# Altium footprint library 213_Final_Project.PcbLib: 56 footprints (part 1 of 4)
Each footprint in its own frame and in the unit in brackets; x right, y up, seen from the top. Pads: shape width x height; smd on the part's side, far side on the other; paste and mask are expansions set on the pad; w line width, h text height; cw(c..) or ccw(c..) is an arc to the next point about the centre after c.
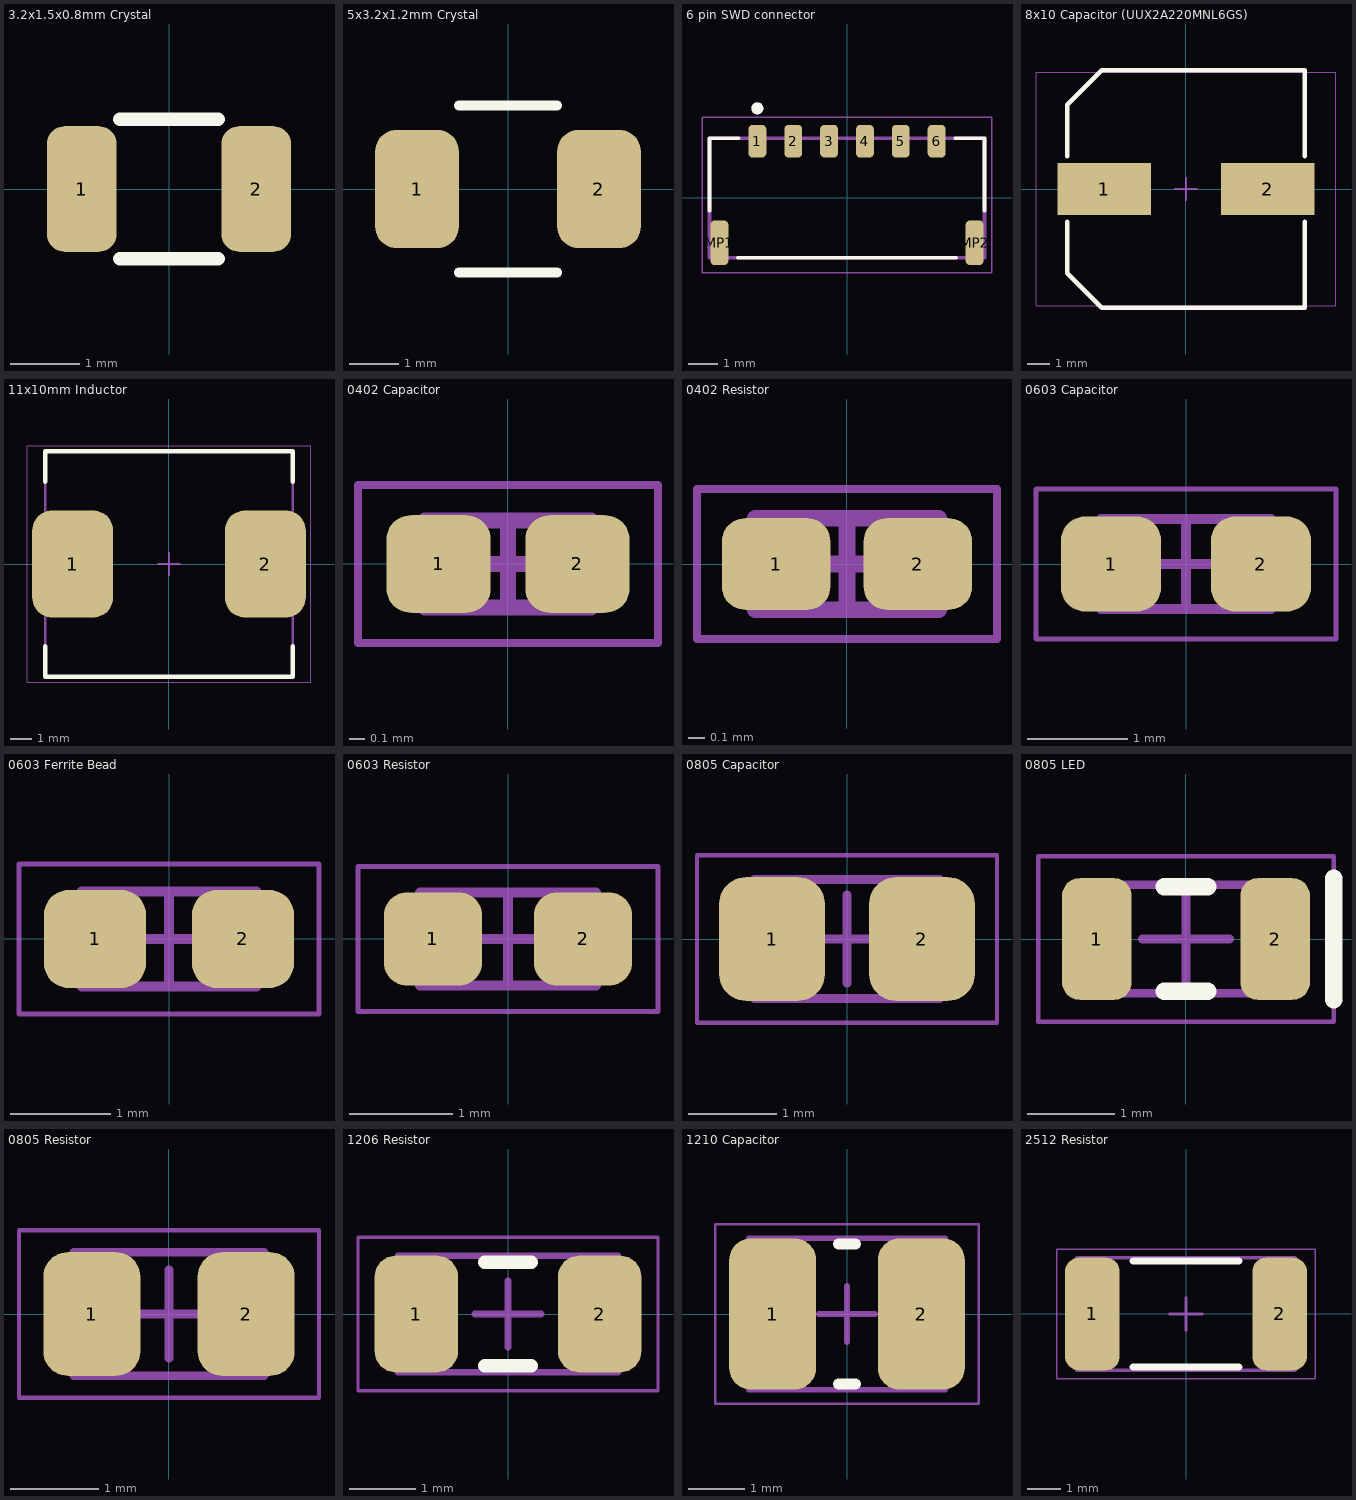
[diagram p0: the footprints below, top view; thin cyan lines are the x and y axes]

## 3.2x1.5x0.8mm Crystal [mm]
pads (2):
  rrect50% 1x1.8 smd: 1(-1.25,0) 2(1.25,0)
Top Overlay:
  lines w0.2: -0.7,-1 0.7,-1 ; -0.7,1 0.7,1
3D body "Crystal3215 (Generic).stp": height 0.8, standoff -0.03, extent -1.6,-0.75 1.6,0.75

## 5x3.2x1.2mm Crystal [mm]
pads (2):
  rrect50% 1.7x2.4 smd: 1(-1.85,0) 2(1.85,0)
Top Overlay:
  lines w0.2: -1,-1.7 1,-1.7 ; -1,1.7 1,1.7
3D body "Crystal5032 (Generic).step": height 0.8, standoff 0, extent -2.5,-1.6 2.5,1.6

## 6 pin SWD connector [mm]
pads (8):
  rrect50% 0.6x1.1 smd: 1(-3,1.9) 2(-1.8,1.9) 3(-0.6,1.9) 4(0.6,1.9) 5(1.8,1.9) 6(3,1.9)
  rrect50% 0.6x1.5 smd: MP1(-4.27,-1.5) MP2(4.27,-1.5)
Top Overlay:
  circle w0.2: c-3,3 r0.1
  lines w0.127: -4.6,-0.43 -4.6,2 -3.62,2 ; -3.65,-2 3.65,-2 ; 3.62,2 4.6,2 4.6,-0.43
Mechanical 13:
  circle w0.2: c-3,3 r0.1
  lines w0.127: -4.6,-2 -4.6,2 4.6,2 4.6,-2 -4.6,-2
Mechanical 15:
  lines w0.05: -4.85,-2.5 4.85,-2.5 4.85,2.7 -4.85,2.7 -4.85,-2.5
3D body "10125839-06RAEHLF.STEP": height 2.5, standoff -0.03, extent -4.6,-2 4.6,2.2

## 8x10 Capacitor (UUX2A220MNL6GS) [mm] "Aluminum Electrolytic Capacitor, Body 8.30x8.30x10.50mm, IPC Low Density"
height 10.5
pads (2):
  rect 4.2x2.35 smd: 1(-3.675,0) 2(3.675,0)
Top Overlay:
  lines w0.2: -5.35,-1.475 -5.35,-3.794 -3.794,-5.35 5.35,-5.35 5.35,-1.475 ; -5.35,1.475 -5.35,3.794 -3.794,5.35 5.35,5.35 5.35,1.475
Mechanical 15:
  lines w0.05: -6.75,-5.25 -6.75,5.25 6.75,5.25 6.75,-5.25 -6.75,-5.25
  lines w0.1: -0.5,0 0.5,0 ; 0,-0.5 0,0.5
3D body "10mm Cap (UUX2A220MNL6GS).STEP": height 10.3, standoff 0, extent -5.45,-5.15 5.45,5.15

## 11x10mm Inductor [mm] "Precision Wire Wound Inductor, 2-Leads, Body 11.00x10.00mm, IPC Medium Density"
height 5.4
pads (2):
  rrect50% 3.7x4.9 smd: 1(-4.4,0) 2(4.4,0)
Top Overlay:
  lines w0.2: -5.65,-3.75 -5.65,-5.15 5.65,-5.15 5.65,-3.75 ; -5.65,3.75 -5.65,5.15 5.65,5.15 5.65,3.75
Mechanical 13:
  lines w0.1: -5.65,-5.15 -5.65,5.15 5.65,5.15 5.65,-5.15 -5.65,-5.15
Mechanical 15:
  lines w0.05: -6.475,-5.4 -6.475,5.4 6.475,5.4 6.475,-5.4 -6.475,-5.4
  lines w0.1: -0.5,0 0.5,0 ; 0,-0.5 0,0.5
3D body "SRP1050WA-180M.step": height 5.4, standoff 0, extent -5.5,-5 5.5,5

## 0402 Capacitor [mm] "Chip Capacitor, 2-Leads, Body 1.00x0.50mm, IPC Medium Density"
height 0.4
pads (2):
  rrect50% 0.66x0.62 smd: 1(-0.44,0) 2(0.44,0)
Mechanical 13:
  lines w0.1: -0.525,-0.275 -0.525,0.275 0.525,0.275 0.525,-0.275 -0.525,-0.275
Mechanical 15:
  lines w0.05: -0.95,-0.5 -0.95,0.5 0.95,0.5 0.95,-0.5 -0.95,-0.5
  lines w0.1: -0.275,0 0.275,0 ; 0,-0.275 0,0.275
3D body "Cap0402 (Generic).stp": height 0.5, standoff 0, extent -0.5,-0.25 0.5,0.25

## 0402 Resistor [mm] "Chip Resistor, 2-Leads, Body 1.00x0.50mm, IPC Medium Density"
height 0.4
pads (2):
  rrect50% 0.65x0.55 smd: 1(-0.425,0) 2(0.425,0)
Mechanical 13:
  lines w0.1: -0.55,-0.275 -0.55,0.275 0.55,0.275 0.55,-0.275 -0.55,-0.275
Mechanical 15:
  lines w0.05: -0.9,-0.45 -0.9,0.45 0.9,0.45 0.9,-0.45 -0.9,-0.45
  lines w0.1: -0.275,0 0.275,0 ; 0,-0.275 0,0.275
3D body "Res0402 (Generic).stp": height 0.35, standoff 0, extent -0.5,-0.25 0.5,0.25

## 0603 Capacitor [mm] "Chip Capacitor, 2-Leads, Body 1.60x0.80mm, IPC Medium Density"
height 0.6
pads (2):
  rrect50% 1x0.95 smd: 1(-0.75,0) 2(0.75,0)
Mechanical 13:
  lines w0.1: -0.85,-0.45 0.85,-0.45 0.85,0.45 -0.85,0.45 -0.85,-0.45
Mechanical 15:
  lines w0.05: -1.5,-0.75 1.5,-0.75 1.5,0.75 -1.5,0.75 -1.5,-0.75
  lines w0.1: -0.45,0 0.45,0 ; 0,-0.45 0,0.45
3D body "Cap0603 (Generic).stp": height 0.8, standoff 0, extent -0.8,-0.4 0.8,0.4

## 0603 Ferrite Bead [mm] "Chip Ferrite Bead, 2-Leads, Body 1.60x0.80mm, IPC Medium Density"
height 0.7
pads (2):
  rrect50% 1.02x0.98 smd: 1(-0.74,0) 2(0.74,0)
Mechanical 13:
  lines w0.1: -0.875,-0.475 0.875,-0.475 0.875,0.475 -0.875,0.475 -0.875,-0.475
Mechanical 15:
  lines w0.05: -1.5,-0.75 1.5,-0.75 1.5,0.75 -1.5,0.75 -1.5,-0.75
  lines w0.1: -0.475,0 0.475,0 ; 0,-0.475 0,0.475
3D body "FB0603.STEP": height 0.8, standoff 0, extent -0.8,-0.4 0.8,0.4

## 0603 Resistor [mm] "Chip Resistor, 2-Leads, Body 1.60x0.80mm, IPC Medium Density"
height 0.55
pads (2):
  rrect50% 0.95x0.9 smd: 1(-0.725,0) 2(0.725,0)
Mechanical 13:
  lines w0.1: -0.85,-0.45 -0.85,0.45 0.85,0.45 0.85,-0.45 -0.85,-0.45
Mechanical 15:
  lines w0.05: -1.45,-0.7 -1.45,0.7 1.45,0.7 1.45,-0.7 -1.45,-0.7
  lines w0.1: -0.45,0 0.45,0 ; 0,-0.45 0,0.45
3D body "Res0603 (Generic).stp": height 0.45, standoff 0, extent -0.8,-0.4 0.8,0.4

## 0805 Capacitor [mm] "Chip Capacitor, 2-Leads, Body 2.00x1.25mm, IPC Medium Density"
height 1
pads (2):
  rrect50% 1.2x1.4 smd: 1(-0.85,0) 2(0.85,0)
Mechanical 13:
  lines w0.1: -1.05,-0.675 1.05,-0.675 1.05,0.675 -1.05,0.675 -1.05,-0.675
Mechanical 15:
  lines w0.05: -1.7,-0.95 1.7,-0.95 1.7,0.95 -1.7,0.95 -1.7,-0.95
  lines w0.1: -0.5,0 0.5,0 ; 0,-0.5 0,0.5
3D body "Cap0805 (Generic).stp": height 1.25, standoff 0, extent -1,-0.625 1,0.625

## 0805 LED [mm] "Chip LED. 2-Leads, Body 2.00x1.25mm, IPC Medium Density"
height 0.6
pads (2):
  rrect50% 0.8x1.4 smd: 1(-1.025,0) 2(1.025,0)
Top Overlay:
  lines w0.2: -0.25,-0.6 0.25,-0.6 ; -0.25,0.6 0.25,0.6 ; 1.7,-0.7 1.7,0.7
Mechanical 13:
  lines w0.1: -1,-0.625 -1,0.625 1,0.625 1,-0.625 -1,-0.625
Mechanical 15:
  lines w0.05: -1.7,-0.95 -1.7,0.95 1.7,0.95 1.7,-0.95 -1.7,-0.95
  lines w0.1: -0.5,0 0.5,0 ; 0,-0.5 0,0.5
3D body "LED0805 (Generic).step": height 0.78, standoff 0, extent -1,-0.625 1,0.625

## 0805 Resistor [mm] "Chip Resistor, 2-Leads, Body 2.00x1.25mm, IPC Medium Density"
height 0.6
pads (2):
  rrect50% 1.1x1.4 smd: 1(-0.875,0) 2(0.875,0)
Mechanical 13:
  lines w0.1: -1.075,-0.7 -1.075,0.7 1.075,0.7 1.075,-0.7 -1.075,-0.7
Mechanical 15:
  lines w0.05: -1.7,-0.95 -1.7,0.95 1.7,0.95 1.7,-0.95 -1.7,-0.95
  lines w0.1: -0.5,0 0.5,0 ; 0,-0.5 0,0.5
3D body "Res0805 (Generic).stp": height 0.5, standoff 0, extent -1,-0.625 1,0.625

## 1206 Resistor [mm] "Chip Resistor, 2-Leads, Body 3.10x1.60mm, IPC Medium Density"
height 0.65
pads (2):
  rrect50% 1.25x1.75 smd: 1(-1.375,0) 2(1.375,0)
Top Overlay:
  lines w0.2: -0.35,-0.775 0.35,-0.775 ; -0.35,0.775 0.35,0.775
Mechanical 13:
  lines w0.1: -1.65,-0.875 1.65,-0.875 1.65,0.875 -1.65,0.875 -1.65,-0.875
Mechanical 15:
  lines w0.05: -2.25,-1.15 2.25,-1.15 2.25,1.15 -2.25,1.15 -2.25,-1.15
  lines w0.1: -0.5,0 0.5,0 ; 0,-0.5 0,0.5
3D body "Res1206.step": height 0.62, standoff 0.01, extent -1.6,-0.8 1.6,0.8

## 1210 Capacitor [mm] "Chip Capacitor, 2-Leads, Body 3.20x2.50mm, IPC Medium Density"
height 1.2
pads (2):
  rrect50% 1.55x2.7 smd: 1(-1.325,0) 2(1.325,0)
Top Overlay:
  lines w0.2: -0.15,-1.25 0.15,-1.25 ; -0.15,1.25 0.15,1.25
Mechanical 13:
  lines w0.1: -1.75,-1.35 -1.75,1.35 1.75,1.35 1.75,-1.35 -1.75,-1.35
Mechanical 15:
  lines w0.05: -2.35,-1.6 -2.35,1.6 2.35,1.6 2.35,-1.6 -2.35,-1.6
  lines w0.1: -0.5,0 0.5,0 ; 0,-0.5 0,0.5
3D body "Cap1210 (Generic).stp": height 1.9, standoff 0, extent -1.6,-1.25 1.6,1.25

## 2512 Resistor [mm] "Chip Resistor, 2-Leads, Body 6.40x3.20mm, IPC Medium Density"
height 1
pads (2):
  rrect50% 1.65x3.4 smd: 1(-2.825,0) 2(2.825,0)
Top Overlay:
  lines w0.2: -1.6,-1.6 1.6,-1.6 ; -1.6,1.6 1.6,1.6
Mechanical 13:
  lines w0.1: -3.3,-1.7 3.3,-1.7 3.3,1.7 -3.3,1.7 -3.3,-1.7
Mechanical 15:
  lines w0.05: -3.9,-1.95 3.9,-1.95 3.9,1.95 -3.9,1.95 -3.9,-1.95
  lines w0.1: -0.5,0 0.5,0 ; 0,-0.5 0,0.5
3D body "Res2512.step": height 0.66, standoff 0.01, extent -3.15,-1.6 3.15,1.6